# Altium schematic symbol library 2020-05-03_15-33-35.SchLib: 2 symbols
Pins are listed as number, name and electrical type; pins without a type are passive.

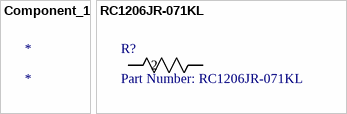
[diagram p0: symbols Component_1 to RC1206JR-071KL]

## Component_1
designator *

## RC1206JR-071KL
designator R?, comment Part Number: RC1206JR-071KL
No Description Available; Vendor: Yageo; Built_By: EMA_UL_Team; Manufacturer_Part_Number: RC1206JR-071KL; Copyright: Copyright (C) 2018 Accelerated Designs. All rights reserved; RefDes: RefDes; Type: DEV; Value: Value
footprint RC1206N
pins: 1, 2